# Altium integrated library VIETTIEN_2.IntLib: 39 symbols (part 2 of 2)

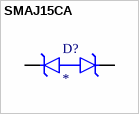
[diagram p23: symbol SMAJ15CA]

## SMAJ15CA
designator D?
SMAJ15CA, Bi-Directional TVS Diode, 400W, 2-Pin DO-214AC | Littelfuse SMAJ15CA
footprint DIOM4325X250N
pins: 1 (io), 2 (io)


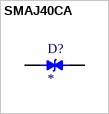
[diagram p24: symbol SMAJ40CA]

## SMAJ40CA
designator D?
Transient Voltage Suppressor, TVS, Transil SMAJ Series, Bidirectional, 40 V, DO-214AC, 2, 44.4 V; MF: STMicroelectronics; MP: SMAJ40CA-TR; SnapEDA_Link: https://www.snapeda.com/parts/SMAJ40CA-TR/STMicroelectronics/view-part/?ref=snap; Package: DO-214 STMicroelectronics; Value: *; Check_prices: https://www.snapeda.com/parts/SMAJ40CA-TR/STMicroelectronics/view-part/?ref=eda
footprint DIOM4325X250N
pins: 1, 2


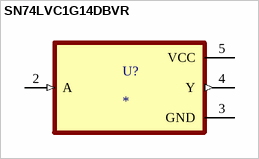
[diagram p25: symbol SN74LVC1G14DBVR]

## SN74LVC1G14DBVR
designator U?
Single 1.65-V to 5.5-V inverter with Schmitt-Trigger inputs; MF: Texas Instruments; MP: SN74LVC1G14DBVR; SnapEDA_Link: https://www.snapeda.com/parts/SN74LVC1G14DBVR/Texas+Instruments/view-part/?ref=snap; Package: SOT-23-5 Texas Instruments; Value: *; Check_prices: https://www.snapeda.com/parts/SN74LVC1G14DBVR/Texas+Instruments/view-part/?ref=eda
footprint SOT95P280X145-5N
pins: 2 A (in), 3 GND (power), 4 Y (out), 5 VCC (power)


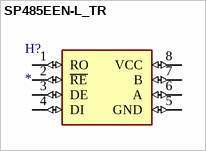
[diagram p26: symbol SP485EEN-L_TR]

## SP485EEN-L_TR
designator H?
SP485E Series 10Mbps 5V Enhanced Low EMI Half Duplex RS-485 Transceiver -NSOIC-8; MF: MaxLinear, Inc.; MP: SP485EEN-L/TR; SnapEDA_Link: https://www.snapeda.com/parts/SP485EEN-L/TR/MaxLinear/view-part/?ref=snap; Package: SOIC-8 Exar; Value: *; Check_prices: https://www.snapeda.com/parts/SP485EEN-L/TR/MaxLinear/view-part/?ref=eda
footprint SOIC127P600X175-8N
pins: 1 RO (io), 2 ~{RE} (io), 3 DE (io), 4 DI (io), 5 GND (io), 6 A (io), 7 B (io), 8 VCC (io)


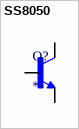
[diagram p27: symbol SS8050]

## SS8050
designator Q?
NPN Epitaxial Silicon Transistor; MF: ON Semiconductor / Fairchild; MP: SS8050; SnapEDA_Link: https://www.snapeda.com/parts/SS8050/Fairchild+Semiconductor/view-part/?ref=snap; Package: TO-92-3 ON Semiconductor; Value: *; Check_prices: https://www.snapeda.com/parts/SS8050/Fairchild+Semiconductor/view-part/?ref=eda
footprint SOT-23_BEC
pins: B, C, E


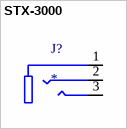
[diagram p28: symbol STX-3000]

## STX-3000
designator J?
3.50mm (0.141, 1/8, Mini Plug) - Headphone Phone Jack Stereo (3 Conductor, TRS) Connector Kinked Pin; MF: Kycon; SnapEDA_Link: https://www.snapeda.com/parts/STX-3000/Kycon/view-part/?ref=snap; Package: None; Value: *; MP: STX-3000; Check_prices: https://www.snapeda.com/parts/STX-3000/Kycon/view-part/?ref=eda
footprint KYCON_STX-3000
pins: 1, 2, 3


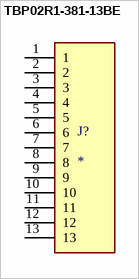
[diagram p29: symbol TBP02R1-381-13BE]

## TBP02R1-381-13BE
designator J?
2~24 Poles, Pluggable,Receptacle, Horizontal, 3.81 Pitch, Terminal Block Connector; MANUFACTURER: Same Sky; MPN: TBP02R1-381-13BE; DATASHEET_URL: https://s3.amazonaws.com/snapeda/datasheet/TBP02R1-381-13BE_CUI_Devices.pdf; STANDARD: Manufacturer Recommendations; Value: *; SOURCE_URL: https://www.snapeda.com/parts/TBP02R1-381-13BE/Same+Sky/view-part/
footprint CUI_TBP02R1-381-13BE
pins: 1, 2, 3, 4, 5, 6, 7, 8, 9, 10, 11, 12, 13


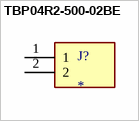
[diagram p30: symbol TBP04R2-500-02BE]

## TBP04R2-500-02BE
designator J?
2~24 Poles, Pluggable, Receptacle, Vertical, 5.0 Pitch, Terminal Block Connector; MF: Same Sky; MP: TBP04R2-500-02BE; SnapEDA_Link: https://www.snapeda.com/parts/TBP04R2-500-02BE/Same+Sky/view-part/?ref=snap; Package: None; Value: *; Check_prices: https://www.snapeda.com/parts/TBP04R2-500-02BE/Same+Sky/view-part/?ref=eda
footprint CUI_TBP04R2-500-02BE
pins: 1, 2


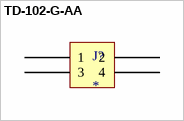
[diagram p31: symbol TD-102-G-AA]

## TD-102-G-AA
designator J?
4-Pin (2x2) Double-Row Vertical Male Header, 2.54mm Pitch, THT, Gold-Plated
footprint PCBComponent
pins: 1, 2, 3, 4


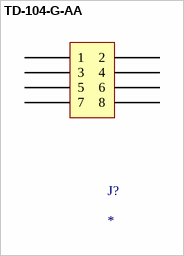
[diagram p32: symbol TD-104-G-AA]

## TD-104-G-AA
designator J?
8-Pin (2x4) Double-Row Vertical Male Header, 2.54mm Pitch, THT, Gold-Plated
footprint PCBComponent_1
pins: 1, 2, 3, 4, 5, 6, 7, 8


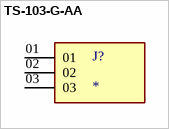
[diagram p33: symbol TS-103-G-AA]

## TS-103-G-AA
designator J?
Conn Unshrouded Header HDR 3 POS 2.54mm Solder ST Thru-Hole Bulk; MP: TS-103-G-AA; MF: Samtec; Price: None; Purchase-URL: https://pricing.snapeda.com/search/part/TS-103-G-AA/?ref=eda; Package: None; Check_prices: https://www.snapeda.com/parts/TS-103-G-AA/Samtec/view-part/?ref=eda; Value: *; Availability: In Stock; SnapEDA_Link: https://www.snapeda.com/parts/TS-103-G-AA/Samtec/view-part/?ref=snap
footprint SAMTEC_TS-103-G-AA
pins: 01, 02, 03


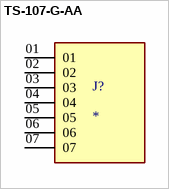
[diagram p34: symbol TS-107-G-AA]

## TS-107-G-AA
designator J?
Conn Unshrouded Header HDR 7 POS 2.54mm Solder ST Top Entry Thru-Hole Tube; MP: TS-107-G-AA; MF: Samtec Inc.; Value: *; Package: None; Check_prices: https://www.snapeda.com/parts/TS-107-G-AA/Samtec/view-part/4675875/?ref=eda; Purchase-URL: https://pricing.snapeda.com/search/part/TS-107-G-AA/?ref=eda; Price: None; SnapEDA_Link: https://www.snapeda.com/parts/TS-107-G-AA/Samtec/view-part/4675875/?ref=snap; Availability: In Stock
footprint SAMTEC_TS-107-G-AA
pins: 01, 02, 03, 04, 05, 06, 07


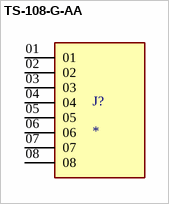
[diagram p35: symbol TS-108-G-AA]

## TS-108-G-AA
designator J?
Conn Unshrouded Header HDR 8 POS 2.54mm Solder ST Thru-Hole Tube; MF: Samtec; MP: TS-108-G-AA; Purchase-URL: https://pricing.snapeda.com/search/part/TS-108-G-AA/?ref=eda; SnapEDA_Link: https://www.snapeda.com/parts/TS-108-G-AA/Samtec/view-part/?ref=snap; Value: *; Check_prices: https://www.snapeda.com/parts/TS-108-G-AA/Samtec/view-part/?ref=eda; Availability: In Stock; Price: None; Package: None
footprint SAMTEC_TS-108-G-AA
pins: 01, 02, 03, 04, 05, 06, 07, 08


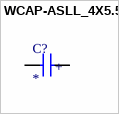
[diagram p36: symbol WCAP-ASLL_4X5.5]

## WCAP-ASLL_4X5.5
designator C?
CAP ALUM 10UF 20% 25V SMD; MF: WÃ¼rth Elektronik; MP: 865060440001; SnapEDA_Link: https://www.snapeda.com/parts/865060440001/W%25C3%25BCrth+Elektronik+Midcom/view-part/?ref=snap; Package: Radial WÃ¼rth Elektronik; Value: *; Check_prices: https://www.snapeda.com/parts/865060440001/W%25C3%25BCrth+Elektronik+Midcom/view-part/?ref=eda
footprint WCAP-ASLL_4X5.5(DXL)
pins: 1 POS, 2 NEG
text: +


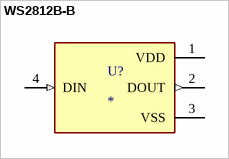
[diagram p37: symbol WS2812B-B]

## WS2812B-B
designator U?
Intelligent control LED integrated light source; MP: WS2812B-B; Availability: Unavailable; Price: None; Package: None; Value: *
footprint LED_WS2812B-B
pins: 1 VDD (power), 2 DOUT (out), 3 VSS (power), 4 DIN (in)


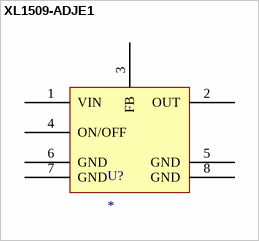
[diagram p38: symbol XL1509-ADJE1]

## XL1509-ADJE1
designator U?
2A 150KHz 40V Buck DC to DC Converter; MF: Texas Instruments; MP: LM358DR; SnapEDA_Link: https://www.snapeda.com/parts/LM358DR/Texas+Instruments/view-part/?ref=snap; Package: SOIC-8 Texas Instruments; Value: *; Check_prices: https://www.snapeda.com/parts/LM358DR/Texas+Instruments/view-part/?ref=eda
footprint SOIC127P599X175-8N
pins: 1 VIN, 2 OUT, 3 FB, 4 ON/OFF, 5 GND, 6 GND, 7 GND, 8 GND